# Altium schematic symbol library Capacitor_1000uF_25V_R5mm_pitch5mm.SchLib: 1 symbol
Pins are listed as number, name and electrical type; pins without a type are passive.

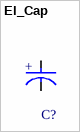
[diagram p0: symbol El_Cap]

## El_Cap
designator C?
Aluminum Electrolytic Capacitors (Radial Lead Type) 1000uF ±20% 25V; ESR (Equivalent Series Resistance): 18mR; Ripple Current: 2.47A; Capacitance: 1mF; Life (Hours): 10000Hour; Polarity: Polar; Lead Diameter: 0.6mm; Lead/Base Style: Straight; Height: 25mm; Voltage: 25V; Tolerance: 20%; Length: 25mm; Voltage Rating (DC): 25V; Mount: Through Hole; RoHS Compliant: Yes; REACH SVHC: No SVHC; Max Operating Temperature: 105°C; Lead Pitch: 5mm; Series: FR; Package Quantity: 200; Contact Plating: Tin; Impedance: 18mR; Packaging: Bulk; Diameter: 10mm; Case/Package: Radial; Termination: Radial; Construction: RADIAL; Voltage Rating: 25V; Min Operating Temperature: -40°C; Radiation Hardening: No; Height - Seated (Max): 1.063inch
footprint El_Cap
pins: 1 C, 2 A
text: +